# Altium schematic symbol library BIblioteka.SchLib: 66 symbols (part 1 of 3)
Pins are listed as number, name and electrical type; pins without a type are passive.

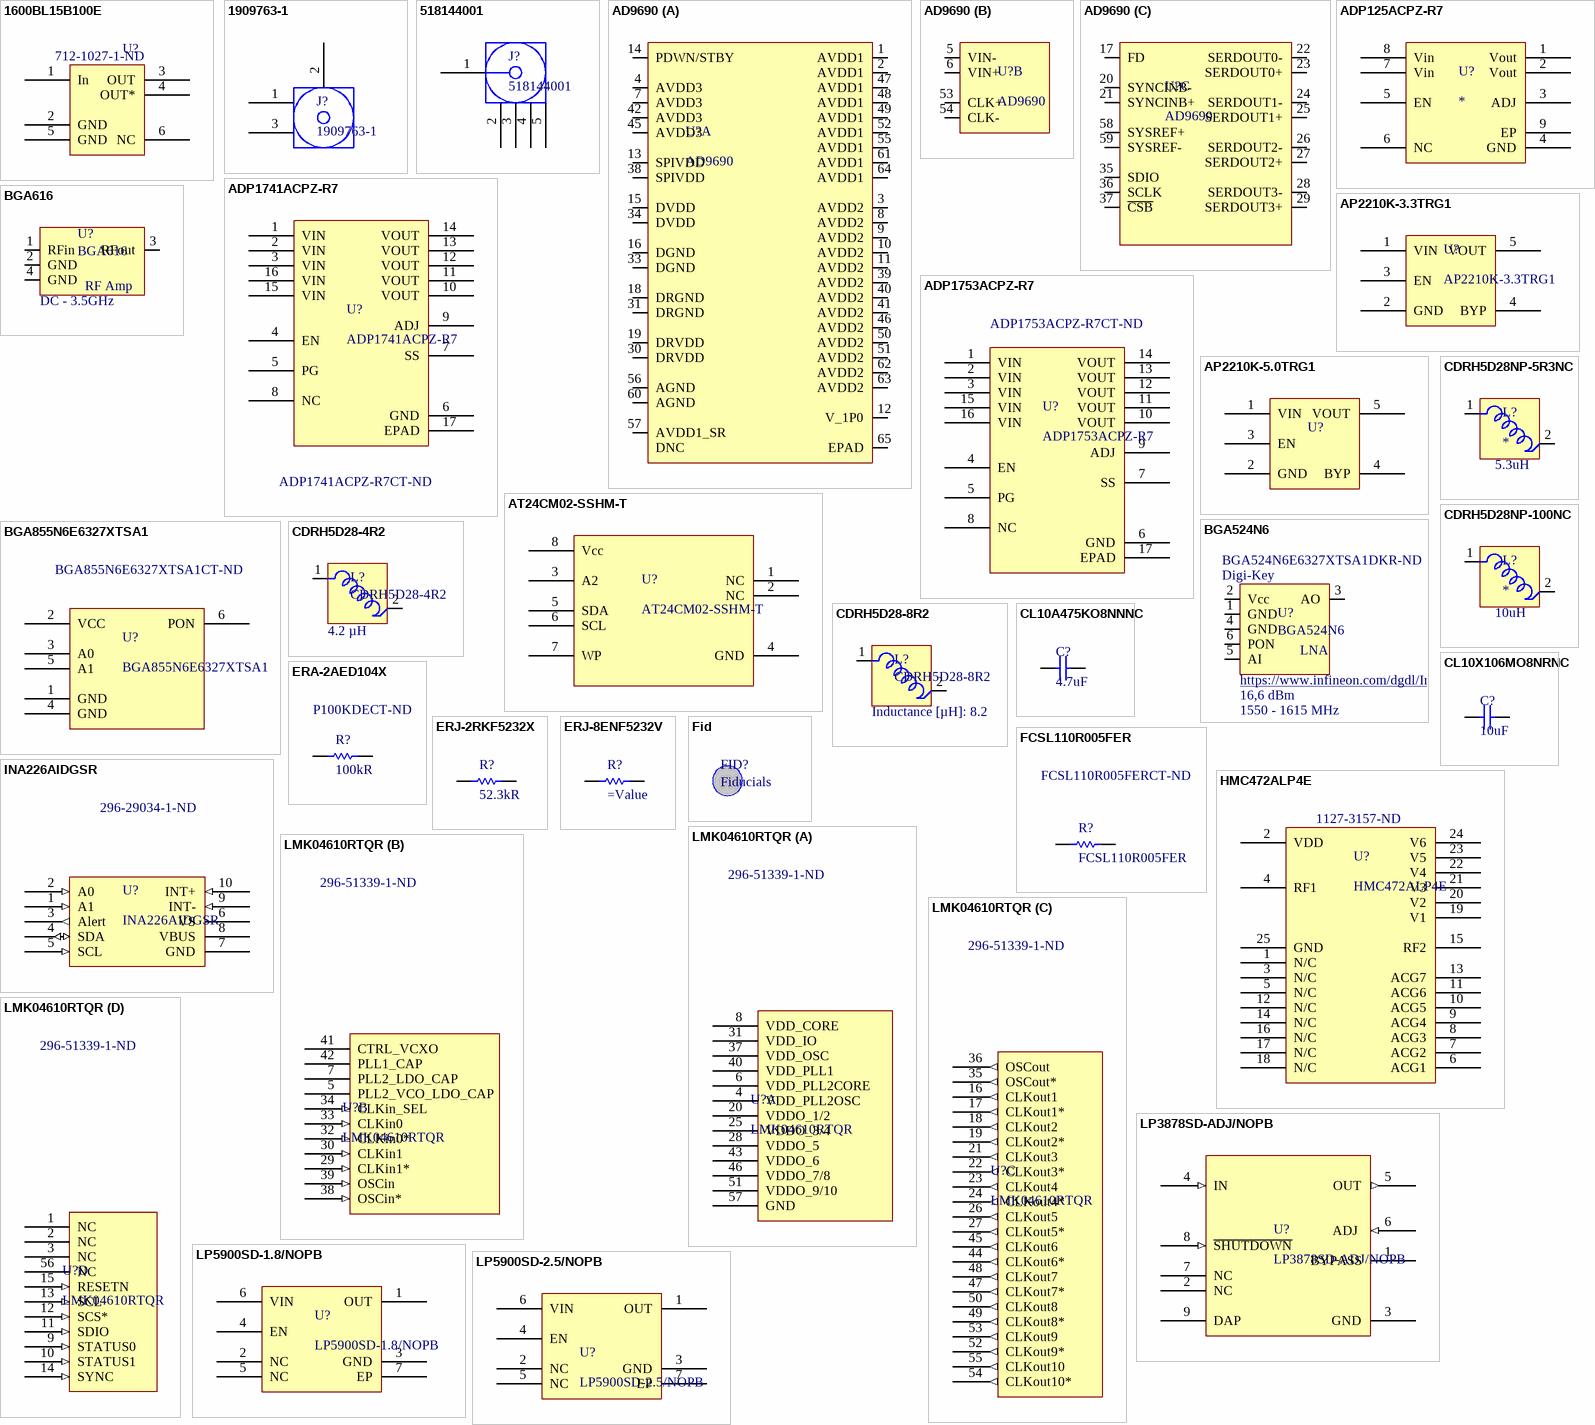
[diagram p0: symbols 1600BL15B100E to LP5900SD-2.5/NOPB]

## 1600BL15B100E
designator U?  Supplier Part Number 1: 712-1027-1-ND  (hidden comment: *)
BALUN WIMAX1600MHZ; Manufacturer: Johanson; Manufacturer Part Number: 1600BL15B100E; Frequency: 1.6GHz; Insertion Loss: 1dB; Impedance: 100R; Supplier 1: Digi-Key; RoHS: Yes; Category: Uncategorized; Stock 1: 406; Pricing 1: 1=0,83000, 10=0,80900, 25=0,54120, 50=0,48180, 100=0,44140, 250=0,39600, 500=0,38776, 1000=0,28050 (USD); Mount: Surface Mount; Case/Package: 0805; Case Code (Metric): 2012; Case Code (Imperial): 0805; Min Operating Temperature: -40°C; Max Operating Temperature: 85°C; Termination: SMD/SMT; Composition: Ceramic; Packaging: Tape and Reel; Package Quantity: 4000; Radiation Hardening: No; ComponentLink1URL: https://datasheet.ciiva.com/24023/balun-1600bl15b100-v2-242372-24023192.pdf?src-supplier=Mouser; ComponentLink1Description: https://datasheet.ciiva.com/24023/balun-1600bl15b100-v2-242372-24023192.pdf?src-supplier=Mouser; ComponentLink2URL: https://datasheet.ciiva.com/3859/balun-1600bl15b100-v2-3859272.pdf?src-supplier=Arrow+Electronics; ComponentLink2Description: https://datasheet.ciiva.com/3859/balun-1600bl15b100-v2-3859272.pdf?src-supplier=Arrow+Electronics; ComponentLink3URL: https://datasheet.ciiva.com/2788/1600bl15b100-2788754.pdf?src-supplier=Digi-Key; ComponentLink3Description: https://datasheet.ciiva.com/2788/1600bl15b100-2788754.pdf?src-supplier=Digi-Key; ComponentLink4URL: https://datasheet.ciiva.com/2788/1600bl15b100-2788755.pdf?src-supplier=Digi-Key; ComponentLink4Description: https://datasheet.ciiva.com/2788/1600bl15b100-2788755.pdf?src-supplier=Digi-Key; ComponentLink5URL: https://datasheet.ciiva.com/2788/1600bl15b100-2788756.pdf?src-supplier=Digi-Key; ComponentLink5Description: https://datasheet.ciiva.com/2788/1600bl15b100-2788756.pdf?src-supplier=Digi-Key
footprint 1600BL15B100 (1.7GHz 1:2 Ratio RF Balun, EIA 0805 SMD)
pins: 1 In "Unbalanced", 2 GND "GND (when no DC feed) or DC Bias+ RF Bypass Cap( when DC feed needed)", 3 OUT, 4 OUT*, 5 GND "GND (when no DC feed) or DC Bias+ RF Bypass Cap( when DC feed needed)", 6 NC

## 1909763-1
designator J?
Conn Coaxial PL 50Ohm Solder ST SMD Gold Over Nickel T/R; Manufacturer: TE Connectivity AMP; Body Material: Polymer,Liquid Crystal Polymer; Dielectric Material: Polymer; Impedance: 50R; Max Frequency: 6GHz; Connector Type: Jack; Gender: Female; Connector System: Cable-to-Board; Number of Positions: 1; Sealable: No (Without); Supplier 1: Digi-Key; Manufacturer Part Number: 1909763-1; Stock 1: 101549; Pricing 1: 1 = 0,50000, 10 = 0,47200, 100 = 0,36150, 500 = 0,31436, 1000 = 0,25935 (USD); RoHS: Yes; Mount: Panel; Case/Package: SMD/SMT; Contact Plating: Gold; Contact Material: Copper Alloy; Housing Color: Beige; Body Plating: Gold; Insulation Material: Thermoplastic; Min Operating Temperature: -40°C; Max Operating Temperature: 194°C; Packaging: Tape and Reel; Package Quantity: 1; Fastening Type: Push,Pull; Termination: SMD/SMT; Orientation: Straight; Frequency: 6GHz; Length: 3mm; Radiation Hardening: No; ELV: Compliant; Lead Free: Lead Free; ComponentLink1URL: https://datasheet.ciiva.com/16312/eng-cd-1909763-b-16312469.pdf?src-supplier=Future+Electronics; ComponentLink1Description: https://datasheet.ciiva.com/16312/eng-cd-1909763-b-16312469.pdf?src-supplier=Future+Electronics; ComponentLink2URL: https://datasheet.ciiva.com/9423/eng-cd-1909763-b-9423785.pdf?src-supplier=Avnet; ComponentLink2Description: https://datasheet.ciiva.com/9423/eng-cd-1909763-b-9423785.pdf?src-supplier=Avnet; ComponentLink3URL: https://datasheet.ciiva.com/29191/eng-cd-1909763-b1-basefilename-29191146.pdf?src-supplier=Digi-Key; ComponentLink3Description: https://datasheet.ciiva.com/29191/eng-cd-1909763-b1-basefilename-29191146.pdf?src-supplier=Digi-Key; ComponentLink4URL: https://datasheet.ciiva.com/16469/eng-cd-1909763-b-16469221.pdf?src-supplier=Avnet+Asia; ComponentLink4Description: https://datasheet.ciiva.com/16469/eng-cd-1909763-b-16469221.pdf?src-supplier=Avnet+Asia; ComponentLink5URL: https://datasheet.ciiva.com/29191/eng-cd-1909763-b1-basefilename-29191148.pdf?src-supplier=Digi-Key; ComponentLink5Description: https://datasheet.ciiva.com/29191/eng-cd-1909763-b1-basefilename-29191148.pdf?src-supplier=Digi-Key; Supplier Part Number 1: A118077CT-ND
footprint 1909763 (U.FL (UMCC) Connector Jack, Male Pin 50Ohm Surface Mount Solder)
pins: 1 Signal "Signal Pin", 2 GND (power), 3 GND (power)

## 518144001
designator J?
AMP - TE CONNECTIVITY - 5-1814400-1 - RF/COAXIAL, SMA JACK, R/A, 50 OHM, SOLDER; Body Plating: Gold; Dielectric Material: PTFE; Impedance: 50R; Frequency: 3GHz; Gender: Female; Mating Cycles: 500; Connector Type: SMA,Jack; Polarity: Standard,Normal; Sealable: No (Without); Connector System: Cable-to-Board; Number of Positions: 1; Voltage Rating: 500V; Tail Length: 0.153inch; Supplier 1: Newark; Manufacturer: TE Connectivity; Manufacturer Part Number: 518144001; Stock 1: 0; RoHS: Yes; Mount: PCB,Through Hole; Case/Package: SMA; Contact Material: Copper; Contact Plating: Copper,Gold; Insulation Material: Polytetrafluoroethylene; Housing Color: Gold; Min Operating Temperature: -67°C; Max Operating Temperature: 185°C; Termination: Through Hole; Orientation: Right Angle; Package Quantity: 1; Fastening Type: Threaded; Packaging: Bag; Max Frequency: 3GHz; Wire/Cable Type: Coaxial; Number of Ports: 1; Length: 0.559inch; Depth: 14.2mm; Radiation Hardening: No; REACH SVHC: No SVHC; ComponentLink1URL: https://datasheet.ciiva.com/25908/eng-cd-1814400-c1-25908579.pdf?src-supplier=Avnet+Europe; ComponentLink1Description: https://datasheet.ciiva.com/25908/eng-cd-1814400-c1-25908579.pdf?src-supplier=Avnet+Europe; ComponentLink2URL: https://datasheet.ciiva.com/642/eng-cd-1814400-d-basefilename-642807.pdf?src-supplier=Digi-Key; ComponentLink2Description: https://datasheet.ciiva.com/642/eng-cd-1814400-d-basefilename-642807.pdf?src-supplier=Digi-Key; ComponentLink3URL: https://datasheet.ciiva.com/11762/0900766b80944169-11762331.pdf?src-supplier=RSComponents; ComponentLink3Description: https://datasheet.ciiva.com/11762/0900766b80944169-11762331.pdf?src-supplier=RSComponents; ComponentLink4URL: https://datasheet.ciiva.com/5717/eng-cd-1814400-d-basefilename-5717965.pdf?src-supplier=Farnell; ComponentLink4Description: https://datasheet.ciiva.com/5717/eng-cd-1814400-d-basefilename-5717965.pdf?src-supplier=Farnell; ComponentLink5URL: https://datasheet.ciiva.com/16226/5-1814400-1-16226909.pdf?src-supplier=Future+Electronics; ComponentLink5Description: https://datasheet.ciiva.com/16226/5-1814400-1-16226909.pdf?src-supplier=Future+Electronics; ComponentLink6URL: https://datasheet.ciiva.com/23769/1663573-23769679.pdf?src-supplier=Newark; ComponentLink6Description: https://datasheet.ciiva.com/23769/1663573-23769679.pdf?src-supplier=Newark; ComponentLink7URL: https://datasheet.ciiva.com/14567/70084631-14567190.pdf?src-supplier=Allied+Electronics; ComponentLink7Description: https://datasheet.ciiva.com/14567/70084631-14567190.pdf?src-supplier=Allied+Electronics; ComponentLink8URL: https://datasheet.ciiva.com/3131/eng-cd-1814400-c1-3131994.pdf?src-supplier=Avnet; ComponentLink8Description: https://datasheet.ciiva.com/3131/eng-cd-1814400-c1-3131994.pdf?src-supplier=Avnet; Supplier Part Number 1: 28AC9813
footprint 5-1814400-1 (SMA Connector Jack, Female Socket 50Ohm Through Hole, Right Angle Solder)
pins: 1 Signal "Signal Pin", 2 GND, 3 GND, 4 GND, 5 GND

## AD9690
designator U?
Manufacturer: Analog Devices; Manufacturer Part Number: AD9690BCPZ-500; Number of Bits: 14; Sampling Rate: 500MS/s; Number of Inputs: 1; Min Supply Voltage: 3.2V; Max Supply Voltage: 3.4V; Interface: Serial; Resolution: 14b; Supply Type: Single; Differential Nonlinearity: 0.5LSB; Integral Nonlinearity (INL): 2.5LSB; Power Dissipation: 1.5W; Supplier 1: Digi-Key; Supplier Part Number 1: AD9690BCPZ-500-ND; Stock 1: 6; Pricing 1: 1 = 199,64000, 10 = 191,20500, 25 = 186,98720 (USD); RoHS: Yes; Mount: Surface Mount; Number of Pins: 64; Min Operating Temperature: -40°C; Max Operating Temperature: 85°C; Packaging: Tray; Number of A/D Converters: 1; REACH SVHC: No SVHC; Lead Free: Lead Free; ComponentLink1URL: http://www.mouser.com/ds/2/609/AD9690-534148.pdf?src-supplier=Mouser; ComponentLink1Description: http://www.mouser.com/ds/2/609/AD9690-534148.pdf?src-supplier=Mouser; ComponentLink2URL: http://www.analog.com/media/en/technical-documentation/data-sheets/AD9690.pdf?src-supplier=Digi-Key; ComponentLink2Description: http://www.analog.com/media/en/technical-documentation/data-sheets/AD9690.pdf?src-supplier=Digi-Key; ComponentLink3URL: http://www.farnell.com/datasheets/2146909.pdf?src-supplier=Element14; ComponentLink3Description: http://www.farnell.com/datasheets/2146909.pdf?src-supplier=Element14; ComponentLink4URL: http://www.analog.com/media/en/technical-documentation/data-sheets/AD9690.pdf?src-supplier=Avnet; ComponentLink4Description: http://www.analog.com/media/en/technical-documentation/data-sheets/AD9690.pdf?src-supplier=Avnet
footprint AD9690 (AD9690 9 x 9mm, 64 pin, 0.5 pitch 7.6sq Pad)
part A pins: 1 AVDD1, 2 AVDD1, 3 AVDD2, 4 AVDD3, 7 AVDD3, 8 AVDD2, 9 AVDD2, 10 AVDD2, 11 AVDD2, 12 V_1P0, 13 SPIVDD, 14 PDWN/STBY, 15 DVDD, 16 DGND, 18 DRGND, 19 DRVDD, 30 DRVDD, 31 DRGND, 33 DGND, 34 DVDD, 38 SPIVDD, 39 AVDD2, 40 AVDD2, 41 AVDD2, 42 AVDD3, 44, 43, 32 DNC, 45 AVDD3, 46 AVDD2, 47 AVDD1, 48 AVDD1, 49 AVDD1, 50 AVDD2, 51 AVDD2, 52 AVDD1, 55 AVDD1, 56 AGND, 57 AVDD1_SR, 60 AGND, 61 AVDD1, 62 AVDD2, 63 AVDD2, 64 AVDD1, 65 EPAD
part B pins: 5 VIN-, 6 VIN+, 53 CLK+, 54 CLK-
part C pins: 17 FD, 20 SYNCINB-, 21 SYNCINB+, 22 SERDOUT0-, 23 SERDOUT0+, 24 SERDOUT1-, 25 SERDOUT1+, 26 SERDOUT2-, 27 SERDOUT2+, 28 SERDOUT3-, 29 SERDOUT3+, 35 SDIO, 36 SCLK, 37 ~{CSB}, 58 SYSREF+, 59 SYSREF-

## ADP125ACPZ-R7
designator U?
IC REG LIN POS ADJ 500MA 8LFCSP; Manufacturer: Analog Devices; Manufacturer Part Number: ADP125ACPZ-R7; Output Voltage: 5V; Number of Outputs: 1; Dropout Voltage: 130mV; Max Input Voltage: 5.5V; Min Input Voltage: 2.3V; Min Current Limit: 550mA; Polarity: Positive; Quiescent Current: 45uA; Reference Voltage: 500mV; Min Output Voltage: 800mV; Accuracy: 1%; Power Supply Rejection Ratio (PSRR): 60dB; Max Supply Current: 210uA; Output Type: Adjustable; Supplier 1: Farnell; Stock 1: 261; RoHS: Yes; Case/Package: MSOP; Number of Pins: 8; Contact Plating: Gold; Min Operating Temperature: -40°C; Max Operating Temperature: 125°C; Output Current: 500mA; Max Output Current: 500mA; Packaging: Tape and Reel; Number of Regulators: 1; Max Output Voltage: 5V; Nominal Supply Current: 45uA; Operating Supply Current: 45uA; Length: 2mm; Height: 0.6mm; Width: 2mm; REACH SVHC: No SVHC; Lead Free: Contains Lead; ComponentLink1URL: https://datasheet.ciiva.com/17365/adp124-125-17365589.pdf?src-supplier=Avnet+Europe; ComponentLink1Description: https://datasheet.ciiva.com/17365/adp124-125-17365589.pdf?src-supplier=Avnet+Europe; ComponentLink2URL: https://datasheet.ciiva.com/2056/adp124-125-2056955.pdf?src-supplier=Digi-Key; ComponentLink2Description: https://datasheet.ciiva.com/2056/adp124-125-2056955.pdf?src-supplier=Digi-Key; ComponentLink3URL: https://datasheet.ciiva.com/2056/adp124-125-2056954.pdf?src-supplier=Digi-Key; ComponentLink3Description: https://datasheet.ciiva.com/2056/adp124-125-2056954.pdf?src-supplier=Digi-Key; ComponentLink4URL: https://datasheet.ciiva.com/2056/adp124-125-2056956.pdf?src-supplier=Digi-Key; ComponentLink4Description: https://datasheet.ciiva.com/2056/adp124-125-2056956.pdf?src-supplier=Digi-Key; ComponentLink5URL: https://datasheet.ciiva.com/48694/001251247-da-01-en-ic-reg-l-adj-adp125acpz-r7-lfcspud-8-adi-48694599.pdf?src-supplier=Conrad; ComponentLink5Description: https://datasheet.ciiva.com/48694/001251247-da-01-en-ic-reg-l-adj-adp125acpz-r7-lfcspud-8-adi-48694599.pdf?src-supplier=Conrad; Supplier 2: Digi-Key; Manufacturer 2: Analog Devices; Manufacturer Part Number 2: ADP125ACPZ-R7; Stock 2: 12322; Pricing 2: 1=1.39000, 10=1.23900, 25=1.17600, 100=0.96600, 250=0.90300, 500=0.79800, 1000=0.63000 (USD); ComponentLink6URL: http://datasheet.octopart.com/ADP125ACPZ-R7-Analog-Devices-datasheet-11525030.pdf?src-supplier=Newark; ComponentLink6Description: http://datasheet.octopart.com/ADP125ACPZ-R7-Analog-Devices-datasheet-11525030.pdf?src-supplier=Newark; ComponentLink7URL: http://datasheet.octopart.com/ADP125ACPZ-R7-Analog-Devices-datasheet-38878834.pdf?src-supplier=Newark; ComponentLink7Description: http://datasheet.octopart.com/ADP125ACPZ-R7-Analog-Devices-datasheet-38878834.pdf?src-supplier=Newark; ComponentLink8URL: http://datasheet.octopart.com/ADP125ACPZ-R7-Analog-Devices-datasheet-10623001.pdf?src-supplier=Analog+Devices; ComponentLink8Description: http://datasheet.octopart.com/ADP125ACPZ-R7-Analog-Devices-datasheet-10623001.pdf?src-supplier=Analog+Devices; ComponentLink9URL: http://datasheet.octopart.com/ADP125ACPZ-R7-Analog-Devices-datasheet-8638579.pdf?src-supplier=Analog+Devices; ComponentLink9Description: http://datasheet.octopart.com/ADP125ACPZ-R7-Analog-Devices-datasheet-8638579.pdf?src-supplier=Analog+Devices; ComponentLink10URL: http://datasheet.octopart.com/ADP125ACPZ-R7-Analog-Devices-datasheet-11776558.pdf?src-supplier=Arrow; ComponentLink10Description: http://datasheet.octopart.com/ADP125ACPZ-R7-Analog-Devices-datasheet-11776558.pdf?src-supplier=Arrow; Supplier Part Number 2: ADP125ACPZ-R7CT-ND; Supplier Part Number 1: 2457144
footprint ADP124_125 (8-Lead Lead Frame Chip Scale Package [LFCSP_UD]  2 mm × 2 mm Body, Ultra Thin, Dual Lead  (CP-8-10))
pins: 1 Vout, 2 Vout, 3 ADJ, 4 GND, 5 EN, 6 NC, 7 Vin, 8 Vin, 9 EP "To GND"

## ADP1741ACPZ-R7
designator U?  Supplier Part Number 1: ADP1741ACPZ-R7CT-ND
IC REG LIN POS ADJ 2A 16LFCSP; Manufacturer: Analog Devices; Output Voltage: 3V; Max Input Voltage: 3.6V; Min Input Voltage: 1.6V; Min Output Voltage: 750mV; Operating Supply Current: 1.8mA; Power Supply Rejection Ratio (PSRR): 70dB; Dropout Voltage: 160mV; Number of Outputs: 1; Min Current Limit: 2.4A; Polarity: Positive; Accuracy: 1%; Output Type: Adjustable; Supplier 1: Digi-Key; Manufacturer Part Number: ADP1741ACPZ-R7; Stock 1: 7057; Pricing 1: 1 = 3,42000, 10 = 3,07000, 25 = 2,90240, 100 = 2,51540, 250 = 2,38644, 500 = 2,14136 (USD); RoHS: Yes; Case/Package: LFCSP EP; Number of Pins: 16; Min Operating Temperature: -40°C; Max Operating Temperature: 125°C; Output Current: 2A; Max Output Current: 2A; Packaging: Tape and Reel; Max Output Voltage: 3V; Max Supply Current: 1.8mA; Number of Regulators: 1; Output Voltage Accuracy: 1%; Radiation Hardening: No; REACH SVHC: No SVHC; Lead Free: Contains Lead; ComponentLink1URL: https://datasheet.ciiva.com/2041/adp1740-1741-2041344.pdf?src-supplier=Digi-Key; ComponentLink1Description: https://datasheet.ciiva.com/2041/adp1740-1741-2041344.pdf?src-supplier=Digi-Key; ComponentLink2URL: https://datasheet.ciiva.com/15364/adp1740-1741-259394-15364336.pdf?src-supplier=Mouser; ComponentLink2Description: https://datasheet.ciiva.com/15364/adp1740-1741-259394-15364336.pdf?src-supplier=Mouser; ComponentLink3URL: https://datasheet.ciiva.com/23604/697190-23604608.pdf?src-supplier=Newark; ComponentLink3Description: https://datasheet.ciiva.com/23604/697190-23604608.pdf?src-supplier=Newark; ComponentLink4URL: https://datasheet.ciiva.com/2041/adp1740-1741-2041345.pdf?src-supplier=Digi-Key; ComponentLink4Description: https://datasheet.ciiva.com/2041/adp1740-1741-2041345.pdf?src-supplier=Digi-Key; ComponentLink5URL: https://datasheet.ciiva.com/3224/adp1740-1741-3224694.pdf?src-supplier=Avnet; ComponentLink5Description: https://datasheet.ciiva.com/3224/adp1740-1741-3224694.pdf?src-supplier=Avnet; ComponentLink6URL: https://datasheet.ciiva.com/17365/adp1740-1741-17365261.pdf?src-supplier=Avnet+Europe; ComponentLink6Description: https://datasheet.ciiva.com/17365/adp1740-1741-17365261.pdf?src-supplier=Avnet+Europe; ComponentLink7URL: https://datasheet.ciiva.com/2041/adp1740-1741-2041343.pdf?src-supplier=Digi-Key; ComponentLink7Description: https://datasheet.ciiva.com/2041/adp1740-1741-2041343.pdf?src-supplier=Digi-Key
footprint ADP1752_1753/ADP1740_1741 (16-Lead Lead Frame Chip Scale Package [LFCSP_WQ]  4 mm × 4 mm Body, Very Very Thin Quad  (CP-16-23))
pins: 1 VIN, 2 VIN, 3 VIN, 4 EN, 5 PG, 6 GND, 7 SS, 8 NC, 9 ADJ, 10 VOUT, 11 VOUT, 12 VOUT, 13 VOUT, 14 VOUT, 15 VIN, 16 VIN, 17 EPAD

## ADP1753ACPZ-R7
designator U?  Supplier Part Number 1: ADP1753ACPZ-R7CT-ND
IC REG LIN POS ADJ 800MA 16LFCSP; Manufacturer: Analog Devices; Number of Outputs: 1; Output Voltage: 3V; Dropout Voltage: 70mV; Max Input Voltage: 3.6V; Min Input Voltage: 1.6V; Min Current Limit: 1A; Polarity: Positive; Accuracy: 2%; Min Output Voltage: 750mV; Power Supply Rejection Ratio (PSRR): 65dB; Nominal Supply Current: 1.4mA; Output Type: Adjustable; Supplier 1: Digi-Key; Manufacturer Part Number: ADP1753ACPZ-R7; Stock 1: 1570; Pricing 1: 1 = 2,85000, 10 = 2,56400, 25 = 2,41880, 100 = 2,06070, 250 = 1,93496, 500 = 1,69308 (USD); RoHS: Yes; Case/Package: LFCSP EP; Number of Pins: 16; Min Operating Temperature: -40°C; Max Operating Temperature: 125°C; Output Current: 800mA; Max Output Current: 800mA; Packaging: Tape and Reel; Number of Regulators: 1; Max Output Voltage: 3V; Operating Supply Current: 1.4mA; Max Supply Current: 1.4mA; Length: 4mm; Height: 0.83mm; Width: 4mm; Radiation Hardening: No; REACH SVHC: No SVHC; Lead Free: Contains Lead; ComponentLink1URL: https://datasheet.ciiva.com/26908/adp1753acpz-r7-26908167.pdf?src-supplier=IIIC; ComponentLink1Description: https://datasheet.ciiva.com/26908/adp1753acpz-r7-26908167.pdf?src-supplier=IIIC; ComponentLink2URL: https://datasheet.ciiva.com/8241/adp1752-1753-8241910.pdf?src-supplier=Avnet; ComponentLink2Description: https://datasheet.ciiva.com/8241/adp1752-1753-8241910.pdf?src-supplier=Avnet; ComponentLink3URL: https://datasheet.ciiva.com/2041/adp1752-1753-2041241.pdf?src-supplier=Digi-Key; ComponentLink3Description: https://datasheet.ciiva.com/2041/adp1752-1753-2041241.pdf?src-supplier=Digi-Key; ComponentLink4URL: https://datasheet.ciiva.com/2041/adp1752-1753-2041242.pdf?src-supplier=Digi-Key; ComponentLink4Description: https://datasheet.ciiva.com/2041/adp1752-1753-2041242.pdf?src-supplier=Digi-Key; ComponentLink5URL: https://datasheet.ciiva.com/2041/adp1752-1753-2041243.pdf?src-supplier=Digi-Key; ComponentLink5Description: https://datasheet.ciiva.com/2041/adp1752-1753-2041243.pdf?src-supplier=Digi-Key; ComponentLink6URL: https://datasheet.ciiva.com/17365/adp1752-1753-17365277.pdf?src-supplier=Avnet+Europe; ComponentLink6Description: https://datasheet.ciiva.com/17365/adp1752-1753-17365277.pdf?src-supplier=Avnet+Europe
footprint ADP1752_1753/ADP1740_1741 (16-Lead Lead Frame Chip Scale Package [LFCSP_WQ]  4 mm × 4 mm Body, Very Very Thin Quad  (CP-16-23))
pins: 1 VIN, 2 VIN, 3 VIN, 4 EN, 5 PG, 6 GND, 7 SS, 8 NC, 9 ADJ, 10 VOUT, 11 VOUT, 12 VOUT, 13 VOUT, 14 VOUT, 15 VIN, 16 VIN, 17 EPAD

## AP2210K-3.3TRG1
designator U?
IC REG LINEAR 3.3V 300MA SOT23-5; Manufacturer 1: Diodes; Dropout Voltage: 250mV; Number of Outputs: 1; Min Input Voltage: 2.5V; Max Input Voltage: 13.2V; Quiescent Current: 150uA; Polarity: Positive; Accuracy: 1%; Power Supply Rejection Ratio (PSRR): 75dB; Output Type: Fixed; Supplier 1: Digi-Key; Manufacturer Part Number 1: AP2210K-3.3TRG1; Stock 1: 89118; Pricing 1: 1=0.42000, 10=0.31700, 100=0.19730, 500=0.13496, 1000=0.10382 (USD); RoHS: Yes; Mount: Surface Mount; Case/Package: SOT-23-5; Number of Pins: 5; Weight: 0.001058oz; Min Operating Temperature: -40°C; Max Operating Temperature: 125°C; Package Quantity: 1; Packaging: Tape and Reel; Max Output Current: 300mA; Output Voltage: 3.3V; Output Current: 300mA; Number of Regulators: 1; Length: 3.02mm; Height: 1.3mm; Width: 1.7mm; Radiation Hardening: No; Lead Free: Lead Free; ComponentLink1URL: http://www.mouser.com/ds/2/115/AP2210-271459.pdf?src-supplier=Mouser; ComponentLink1Description: http://www.mouser.com/ds/2/115/AP2210-271459.pdf?src-supplier=Mouser; ComponentLink2URL: http://www.alliedelec.com/m/d/24500b427815944890653ed70b5a0b32.pdf?src-supplier=Allied+Electronics; ComponentLink2Description: http://www.alliedelec.com/m/d/24500b427815944890653ed70b5a0b32.pdf?src-supplier=Allied+Electronics; ComponentLink3URL: https://www.diodes.com/assets/Datasheets/AP2210.pdf?src-supplier=Digi-Key; ComponentLink3Description: https://www.diodes.com/assets/Datasheets/AP2210.pdf?src-supplier=Digi-Key; ComponentLink4URL: http://www.diodes.com/datasheets/AP2210.pdf?src-supplier=Avnet; ComponentLink4Description: http://www.diodes.com/datasheets/AP2210.pdf?src-supplier=Avnet; Supplier Part Number 1: AP2210K-3.3TRG1DICT-ND
footprint AP2210K-3.3TRG1 (SOT23, 5-Leads, Body 2.96x2.83mm, Pitch 0.95mm, IPC High Density)
pins: 1 VIN, 2 GND, 3 EN, 4 BYP, 5 VOUT

## AP2210K-5.0TRG1
designator U?  (value not drawn)
IC REG LINEAR 5V 300MA SOT23-5; Manufacturer: Diodes; Manufacturer Part Number: AP2210K-5.0TRG1; Output Type: Fixed; Power Supply Rejection Ratio (PSRR): 75dB; Number of Outputs: 1; Min Input Voltage: 2.5V; Max Input Voltage: 13.2V; Dropout Voltage: 250mV; Polarity: Positive; Quiescent Current: 150uA; Accuracy: 1%; Supplier 1: Digi-Key; RoHS: Yes; Category: Voltage Regulators - Linear; Stock 1: 36767; Pricing 1: 1=0,42000, 10=0,34200, 25=0,31280, 100=0,21090, 250=0,17452, 500=0,15998, 1000=0,11999 (USD); Mount: Surface Mount; Case/Package: SOT-23-5; Number of Pins: 5; Weight: 0.001058oz; Min Operating Temperature: -40°C; Max Operating Temperature: 125°C; Max Output Current: 300mA; Output Voltage: 5V; Package Quantity: 3000; Packaging: Tape and Reel; Output Current: 300mA; Number of Regulators: 1; Lead Free: Lead Free; ComponentLink1URL: https://datasheet.ciiva.com/29569/ap2210-29569974.pdf?src-supplier=Digi-Key; ComponentLink1Description: https://datasheet.ciiva.com/29569/ap2210-29569974.pdf?src-supplier=Digi-Key; ComponentLink2URL: https://datasheet.ciiva.com/29569/ap2210-29569975.pdf?src-supplier=Digi-Key; ComponentLink2Description: https://datasheet.ciiva.com/29569/ap2210-29569975.pdf?src-supplier=Digi-Key; ComponentLink3URL: https://datasheet.ciiva.com/29569/ap2210-29569976.pdf?src-supplier=Digi-Key; ComponentLink3Description: https://datasheet.ciiva.com/29569/ap2210-29569976.pdf?src-supplier=Digi-Key; Supplier Part Number 1: AP2210K-5.0TRG1DICT-ND
footprint AP2210K-3.3TRG1 (SOT23, 5-Leads, Body 2.96x2.83mm, Pitch 0.95mm, IPC High Density)
pins: 1 VIN, 2 GND, 3 EN, 4 BYP, 5 VOUT

## AT24CM02-SSHM-T
designator U?
1.7-5.5V 1MHZ IND TMP 8-SOIC-N; Manufacturer: Microchip; Supplier 1: Digi-Key; Manufacturer Part Number: AT24CM02-SSHM-T; Stock 1: 24235; Pricing 1: 1 = 2,51000, 25 = 2,42040, 100 = 2,41540 (USD); RoHS: No; ComponentLink1URL: http://www.microchip.com/mymicrochip/filehandler.aspx?ddocname=en589710&src-supplier=Digi-Key; ComponentLink1Description: http://www.microchip.com/mymicrochip/filehandler.aspx?ddocname=en589710&src-supplier=Digi-Key; Supplier Part Number 1: AT24CM02-SSHM-TCT-ND
footprint AT24CM02
pins: 1 NC, 2 NC, 3 A2, 4 GND, 5 SDA, 6 SCL, 7 WP, 8 Vcc

## BGA524N6
designator U?  Operating Frequency: 1550 - 1615 MHz  Gain: 16,6 dBm  Supplier 1: Digi-Key  Supplier Part Number 1: BGA524N6E6327XTSA1DKR-ND
Part Number: BGA524N6; URL: https://www.infineon.com/dgdl/Infineon-BGA524N6-DS-v03_00-en.pdf?fileId=db3a304344e406b50144e44dfad302b9
footprint TSNP-6-10-FP (TSNP-6-10-FP, SOTFL, 6-Leads, Body 1,10x0,80mm, Pitch 0,40mm, IPC Medium Density)
pins: 1 GND, 2 Vcc, 3 AO, 4 GND, 5 AI, 6 PON
text: LNA

## BGA616
designator U?  Frequency: DC - 3.5GHz
Supplier 1: Digi-Key; Supplier Part Number 1: BGA616H6327XTSA1CT-ND
footprint GPS05605 (SOT343, 4-Leads, Body 2,00x2,15mm, Pitch 1,30mm, IPC High Density)
pins: 1 RFin, 2 GND, 3 RFout, 4 GND
text: RF Amp

## BGA855N6E6327XTSA1
designator U?  Supplier Part Number 1: BGA855N6E6327XTSA1CT-ND
Manufacturer: Infineon; Supplier 1: Digi-Key; Manufacturer Part Number: BGA855N6E6327XTSA1; Stock 1: 11880; Pricing 1: 1 = 0,66000, 10 = 0,57800, 100 = 0,44300, 500 = 0,35020, 1000 = 0,28016 (USD); RoHS: No
footprint BGA855N6 (TSNP-6-10 leadless package (footprint: 0.7 x 1.1 mm2)
pins: 1 GND, 2 VCC, 3 A0, 4 GND, 5 A1, 6 PON

## CDRH5D28-4R2
designator L?  Inductance: 4.2 µH
Supplier 1: Digi-Key; Supplier Part Number 1: 308-2193-1-ND
footprint CDRH5D28 (CDRH5D28 , Precision Wire Wound Inductor, 2-Leads, Body 6,00x6,00mm, IPC High Density)
pins: 1, 2

## CDRH5D28-8R2
designator L?  Inductance [µH]: 8.2
Part Number: CDRH5D28NP-8R2; Supplier Part Number 2: 308-2309-6-ND; Supplier 2: Digi-Key
footprint CDRH5D28 (CDRH5D28 , Precision Wire Wound Inductor, 2-Leads, Body 6,00x6,00mm, IPC High Density)
pins: 1, 2

## CDRH5D28NP-5R3NC
designator L?  Inductance: 5.3uH
INDUCTOR POWER 5.3UH 1.90A SMD; Manufacturer: Sumida; Manufacturer Part Number: CDRH5D28NP-5R3NC; Core Material: Ferrite; DC Resistance (DCR): 38mR; Test Frequency: 100kHz; Tolerance: 30%; Shielding: Shielded; Max DC Current: 1.9A; Supplier 1: Digi-Key; RoHS: Yes; Category: Fixed Inductors; Stock 1: 1381; Pricing 1: 1=0,78000, 10=0,68400, 100=0,48880, 500=0,41056, 1000=0,33235 (USD); Mount: Surface Mount; Case/Package: Nonstandard; Weight: 0.01411oz; Min Operating Temperature: -40°C; Max Operating Temperature: 100°C; Package Quantity: 2000; Packaging: Tape and Reel; Current Rating: 1.9A; Termination: SMD/SMT; DC Current: 1.9A; Military Standard: Not; Length: 6mm; Height: 3mm; Width: 0.224inch; Height - Seated (Max): 0.118inch; Depth: 6mm; Radiation Hardening: No; Lead Free: Lead Free; ComponentLink1URL: https://datasheet.ciiva.com/29691/cdrh5d28-29691750.pdf?src-supplier=Digi-Key; ComponentLink1Description: https://datasheet.ciiva.com/29691/cdrh5d28-29691750.pdf?src-supplier=Digi-Key; ComponentLink2URL: https://datasheet.ciiva.com/29691/cdrh5d28-29691751.pdf?src-supplier=Digi-Key; ComponentLink2Description: https://datasheet.ciiva.com/29691/cdrh5d28-29691751.pdf?src-supplier=Digi-Key; Supplier Part Number 1: 308-2308-1-ND
footprint CDRH5D28 (CDRH5D28 , Precision Wire Wound Inductor, 2-Leads, Body 6,00x6,00mm, IPC High Density)
pins: 1, 2

## CDRH5D28NP-100NC
designator L?  Inductance: 10uH
Inductor Power Shielded Drum Core 10uH 30% 100KHz Ferrite 1.3A 65mOhm DCR T/R; Manufacturer: Sumida; Manufacturer Part Number: CDRH5D28NP-100NC; DC Resistance (DCR): 65mR; Supplier 1: Mouser; RoHS: Yes; Category: Fixed Inductors; Stock 1: 3724; Pricing 1: 1=0,68000, 10=0,52000, 100=0,40200, 1000=0,28900, 2000=0,26300, 10000=0,25500, 24000=0,24600, 50000=0,23800, 100000=0,22600 (USD); Mount: Surface Mount; Case/Package: Nonstandard; Core Material: Ferrite; Min Operating Temperature: -40°C; Max Operating Temperature: 100°C; Tolerance: 30%; Shielding: Shielded; Packaging: Tape and Reel; Package Quantity: 1; Current Rating: 1.3A; Max DC Current: 1.3A; Termination: SMD/SMT; Test Frequency: 100kHz; DC Current: 1.3A; Military Standard: Not; Length: 6mm; Height: 3mm; Width: 6mm; Height - Seated (Max): 0.118inch; Depth: 6mm; Radiation Hardening: No; Lead Free: Lead Free; ComponentLink1URL: https://datasheet.ciiva.com/26793/cdrh5d28np-100nc-26793522.pdf?src-supplier=IIIC; ComponentLink1Description: https://datasheet.ciiva.com/26793/cdrh5d28np-100nc-26793522.pdf?src-supplier=IIIC; Supplier Part Number 1: 851-CDRH5D28NP-100NC
footprint CDRH5D28 (CDRH5D28 , Precision Wire Wound Inductor, 2-Leads, Body 6,00x6,00mm, IPC High Density)
pins: 1, 2

## CL10A475KO8NNNC
designator C?, comment 4.7uF
Cap Ceramic 4.7uF 16V X5R 10% SMD 0603 85C Paper T/R; Manufacturer: Samsung; Manufacturer Part Number: CL10A475KO8NNNC; Supplier 1: Digi-Key; Stock 1: 520133; Pricing 1: 1 = 0,26000, 10 = 0,17800, 100 = 0,10100, 500 = 0,07128, 1000 = 0,06237 (USD); RoHS: Yes; Mount: Surface Mount; Case/Package: 0603; Case Code (Metric): 1608; Case Code (Imperial): 0603; Material: Ceramic; Contact Plating: Tin; Min Operating Temperature: -55°C; Max Operating Temperature: 85°C; Tolerance: 10%; Packaging: Tape and Reel; Package Quantity: 1; Capacitance: 4.7uF; Voltage Rating: 16V; Dielectric: X5R; Voltage: 16V; Length: 1.6mm; Height: 0.8mm; Width: 0.031inch; Thickness: 0.035inch; Depth: 0.8mm; Radiation Hardening: No; ComponentLink1URL: https://datasheet.ciiva.com/25795/cl10a475ko8nnnc-25795890.pdf?src-supplier=Digi-Key; ComponentLink1Description: https://datasheet.ciiva.com/25795/cl10a475ko8nnnc-25795890.pdf?src-supplier=Digi-Key; ComponentLink2URL: https://datasheet.ciiva.com/26838/getdatasheetpartid-358619-26838383.pdf?src-supplier=Verical; ComponentLink2Description: https://datasheet.ciiva.com/26838/getdatasheetpartid-358619-26838383.pdf?src-supplier=Verical; ComponentLink3URL: https://datasheet.ciiva.com/29198/457663-da-01-en-vs-kondensator-0603-29198671.pdf?src-supplier=Conrad; ComponentLink3Description: https://datasheet.ciiva.com/29198/457663-da-01-en-vs-kondensator-0603-29198671.pdf?src-supplier=Conrad; Supplier Part Number 1: 1276-1784-1-ND
footprint CAPC1608X08L (Chip Capacitor, 2-Leads, Body 1,60x0,80mm, IPC High Density)
pins: 1, 2

## CL10X106MO8NRNC
designator C?, comment 10uF
CAP CER 10UF 16V X6S 0603; Manufacturer: Samsung; Manufacturer Part Number: CL10X106MO8NRNC; Tolerance: 20%; Supplier 1: Digi-Key; Stock 1: 52811; Pricing 1: 1 = 0,24000, 10 = 0,16400, 100 = 0,09280, 500 = 0,06548, 1000 = 0,05729 (USD); RoHS: Yes; Mount: Surface Mount; Case/Package: 0603; Case Code (Metric): 1608; Case Code (Imperial): 0603; Min Operating Temperature: -55°C; Max Operating Temperature: 105°C; Packaging: Tape and Reel; Capacitance: 10uF; Voltage Rating: 16V; Length: 0.063inch; Width: 0.031inch; Thickness: 0.035inch; ComponentLink1URL: http://www.samsungsem.com/kr/support/product-search/mlcc/CL10X106MO8NRNC.jsp?src-supplier=Digi-Key; ComponentLink1Description: http://www.samsungsem.com/kr/support/product-search/mlcc/CL10X106MO8NRNC.jsp?src-supplier=Digi-Key; Supplier Part Number 1: 1276-6769-1-ND
footprint CAPC1608X08L (Chip Capacitor, 2-Leads, Body 1,60x0,80mm, IPC High Density)
pins: 1, 2

## ERA-2AED104X
designator R?, comment 100kR  Supplier Part Number 1: P100KDECT-ND
GLOVE, POLYAMIDE, L/FREE, PU, SIZE 6 - More Details; Manufacturer: Panasonic; Manufacturer Part Number: ERA-2AED104X; Tolerance: 0.5%; Power Rating: 63mW; Voltage Rating: 25V; Temperature Coefficient: 25ppm/°C; Supplier 1: Digi-Key; Stock 1: 66411; Pricing 1: 1 = 0,22000, 10 = 0,18800, 100 = 0,07350, 1000 = 0,03077, 2500 = 0,02820, 5000 = 0,02564 (USD); RoHS: Yes; Mount: Surface Mount; Case/Package: 0402; Case Code (Imperial): 0402; Case Code (Metric): 1005; Contact Plating: Tin; Min Operating Temperature: -55°C; Max Operating Temperature: 155°C; Resistance: 100kR; Packaging: Tape and Reel; Package Quantity: 10000; Composition: Metal Film,Thin Film; Number of Terminations: 2; Military Standard: Not; Termination: SMD/SMT; Max Power Dissipation: 63mW; Voltage Rating (DC): 25V; Length: 1mm; Height: 0.016inch; Width: 0.5mm; Depth: 0.5mm; Radiation Hardening: No; REACH SVHC: No SVHC; Lead Free: Lead Free; ComponentLink1URL: https://datasheet.ciiva.com/24028/aoa0000ce26-197354-24028150.pdf?src-supplier=Mouser; ComponentLink1Description: https://datasheet.ciiva.com/24028/aoa0000ce26-197354-24028150.pdf?src-supplier=Mouser; ComponentLink2URL: https://datasheet.ciiva.com/43470/1776116-43470438.pdf?src-supplier=Farnell; ComponentLink2Description: https://datasheet.ciiva.com/43470/1776116-43470438.pdf?src-supplier=Farnell; ComponentLink3URL: https://datasheet.ciiva.com/7830/1776116-7830920.pdf?src-supplier=Element14; ComponentLink3Description: https://datasheet.ciiva.com/7830/1776116-7830920.pdf?src-supplier=Element14; ComponentLink4URL: https://datasheet.ciiva.com/46378/1776116-46378234.pdf?src-supplier=Element14; ComponentLink4Description: https://datasheet.ciiva.com/46378/1776116-46378234.pdf?src-supplier=Element14; ComponentLink5URL: https://datasheet.ciiva.com/16780/70068849-16780139.pdf?src-supplier=Allied+Electronics; ComponentLink5Description: https://datasheet.ciiva.com/16780/70068849-16780139.pdf?src-supplier=Allied+Electronics; ComponentLink6URL: https://datasheet.ciiva.com/9117/aoa0000ce26-9117229.pdf?src-supplier=Avnet; ComponentLink6Description: https://datasheet.ciiva.com/9117/aoa0000ce26-9117229.pdf?src-supplier=Avnet; ComponentLink7URL: https://datasheet.ciiva.com/16511/aoa0000ce26-16511566.pdf?src-supplier=Avnet+Asia; ComponentLink7Description: https://datasheet.ciiva.com/16511/aoa0000ce26-16511566.pdf?src-supplier=Avnet+Asia; ComponentLink8URL: https://datasheet.ciiva.com/30225/54aoa0000ce26-30225311.pdf?src-supplier=Onlinecomponents.com; ComponentLink8Description: https://datasheet.ciiva.com/30225/54aoa0000ce26-30225311.pdf?src-supplier=Onlinecomponents.com
footprint RESC1005X04L (Chip Resistor, 2-Leads, Body 1,00x0,50mm, IPC High Density)
pins: 1, 2

## ERJ-2RKF5232X
designator R?, comment 52.3kR
RES SMD 52.3K OHM 1% 1/10W 0402; Manufacturer: Panasonic; Manufacturer Part Number: ERJ-2RKF5232X; Voltage Rating: 50V; Power Rating: 100mW; Temperature Coefficient: 100ppm/°C; Supplier 1: Digi-Key; Stock 1: 257478; Pricing 1: 1 = 0,10000, 10 = 0,04500, 100 = 0,01830, 1000 = 0,00823, 2500 = 0,00715, 5000 = 0,00590 (USD); RoHS: Yes; Mount: Surface Mount; Case/Package: 0402; Case Code (Imperial): 0402; Case Code (Metric): 1005; Contact Plating: Tin; Min Operating Temperature: -55°C; Max Operating Temperature: 155°C; Resistance: 52.3kR; Tolerance: 1%; Packaging: Tape and Reel; Package Quantity: 1; Termination: SMD/SMT; Composition: Thick Film; Number of Terminations: 2; Military Standard: Not; Max Power Dissipation: 100mW; Voltage Rating (DC): 50V; Features: Automotive AEC-Q200; Length: 1mm; Height: 0.016inch; Width: 0.5mm; Depth: 0.5mm; REACH SVHC: No SVHC; Lead Free: Lead Free; ComponentLink1URL: https://datasheet.ciiva.com/3883/3984280s8821682n1386-3883650.pdf?src-supplier=Arrow; ComponentLink1Description: https://datasheet.ciiva.com/3883/3984280s8821682n1386-3883650.pdf?src-supplier=Arrow; ComponentLink2URL: https://datasheet.ciiva.com/6201/426256-6201381.pdf?src-supplier=Farnell; ComponentLink2Description: https://datasheet.ciiva.com/6201/426256-6201381.pdf?src-supplier=Farnell; ComponentLink3URL: https://datasheet.ciiva.com/9188/aoa0000ce2-9188938.pdf?src-supplier=Avnet; ComponentLink3Description: https://datasheet.ciiva.com/9188/aoa0000ce2-9188938.pdf?src-supplier=Avnet; ComponentLink4URL: https://datasheet.ciiva.com/46389/426256-46389115.pdf?src-supplier=Element14; ComponentLink4Description: https://datasheet.ciiva.com/46389/426256-46389115.pdf?src-supplier=Element14; ComponentLink5URL: https://datasheet.ciiva.com/43460/426256-43460332.pdf?src-supplier=Farnell; ComponentLink5Description: https://datasheet.ciiva.com/43460/426256-43460332.pdf?src-supplier=Farnell; ComponentLink6URL: https://datasheet.ciiva.com/16781/70260748-16781070.pdf?src-supplier=Allied+Electronics; ComponentLink6Description: https://datasheet.ciiva.com/16781/70260748-16781070.pdf?src-supplier=Allied+Electronics; Supplier Part Number 1: P52.3KLCT-ND
footprint RESC1005X04L (Chip Resistor, 2-Leads, Body 1,00x0,50mm, IPC High Density)
pins: 1, 2

## ERJ-8ENF5232V
designator R?
Res Thick Film 1206 52.3K Ohm 1% 1/4W ±100ppm/C Molded SMD Punched Carrier T/R; Manufacturer: Panasonic; Manufacturer Part Number: ERJ-8ENF5232V; Resistance: 52.3kR; Power Rating: 250mW; Voltage Rating: 200V; Temperature Coefficient: 100ppm/°C; Supplier 1: Digi-Key; Stock 1: 54684; Pricing 1: 1 = 0,11000, 10 = 0,10000, 100 = 0,03850, 1000 = 0,01695, 2500 = 0,01464 (USD); RoHS: Yes; Mount: Surface Mount; Case/Package: 1206; Case Code (Imperial): 1206; Case Code (Metric): 3216; Contact Plating: Tin; Min Operating Temperature: -55°C; Max Operating Temperature: 155°C; Tolerance: 1%; Packaging: Tape and Reel; Package Quantity: 1; Composition: Thick Film; Number of Terminations: 2; Max Power Dissipation: 250mW; Voltage Rating (DC): 200V; Features: Automotive AEC-Q200; Military Standard: Not; Termination: SMD/SMT; Length: 3.2mm; Height: 0.028inch; Width: 1.6mm; Depth: 1.6mm; REACH SVHC: Yes; ComponentLink1URL: https://datasheet.ciiva.com/22730/1678782-22730069.pdf?src-supplier=Farnell; ComponentLink1Description: https://datasheet.ciiva.com/22730/1678782-22730069.pdf?src-supplier=Farnell; ComponentLink2URL: https://datasheet.ciiva.com/24066/aoa0000ce2-24066186.pdf?src-supplier=Mouser; ComponentLink2Description: https://datasheet.ciiva.com/24066/aoa0000ce2-24066186.pdf?src-supplier=Mouser; Supplier Part Number 1: P52.3KFCT-ND
footprint RESC3216X06L (Chip Resistor, 2-Leads, Body 3,20x1,60mm, IPC High Density)
pins: 1, 2

## FCSL110R005FER
designator R?  Supplier Part Number 1: FCSL110R005FERCT-ND
RES SMD 5 MOHM 5W 4320 WIDE; Manufacturer: Ohmite; Tolerance: 1%; Resistance: 5mR; Temperature Coefficient: 50ppm/°C; Supplier 1: Digi-Key; Manufacturer Part Number: FCSL110R005FER; Stock 1: 3877; Pricing 1: 1 = 2,79000, 10 = 2,47700, 25 = 2,29720, 50 = 2,16220, 100 = 1,89190, 250 = 1,62164, 500 = 1,35136 (USD); RoHS: Yes; Case/Package: Metal; Number of Pins: 2; Min Operating Temperature: -55°C; Max Operating Temperature: 155°C; Packaging: Tape and Reel; Package Quantity: 1; Max Power Dissipation: 5W; Features: Moisture Resistant; Power Rating: 5W; Termination: SMD/SMT; Composition: Metal Foil; Number of Terminations: 2; Length: 0.197inch; Height: 0.028inch; Width: 11mm; Depth: 5mm; REACH SVHC: Unknown; ComponentLink1URL: https://datasheet.ciiva.com/2484/res-fcsl-2484643.pdf?src-supplier=Digi-Key; ComponentLink1Description: https://datasheet.ciiva.com/2484/res-fcsl-2484643.pdf?src-supplier=Digi-Key; ComponentLink2URL: https://datasheet.ciiva.com/2484/res-fcsl-2484644.pdf?src-supplier=Digi-Key; ComponentLink2Description: https://datasheet.ciiva.com/2484/res-fcsl-2484644.pdf?src-supplier=Digi-Key; ComponentLink3URL: https://datasheet.ciiva.com/2484/res-fcsl-2484645.pdf?src-supplier=Digi-Key; ComponentLink3Description: https://datasheet.ciiva.com/2484/res-fcsl-2484645.pdf?src-supplier=Digi-Key; ComponentLink4URL: https://datasheet.ciiva.com/6181/fcsl-6181333.pdf?src-supplier=Farnell; ComponentLink4Description: https://datasheet.ciiva.com/6181/fcsl-6181333.pdf?src-supplier=Farnell; ComponentLink5URL: https://datasheet.ciiva.com/46422/1812595-46422917.pdf?src-supplier=Element14; ComponentLink5Description: https://datasheet.ciiva.com/46422/1812595-46422917.pdf?src-supplier=Element14; ComponentLink6URL: https://datasheet.ciiva.com/8080/fcsl-8080343.pdf?src-supplier=Element14; ComponentLink6Description: https://datasheet.ciiva.com/8080/fcsl-8080343.pdf?src-supplier=Element14
footprint FCSL110R005FERCT-ND (Wide 4320 (11050 Metric), 2043)
pins: 1, 2

## Fid
designator FID?, comment Fiducials
footprint Fiducials

## HMC472ALP4E
designator U?  Supplier Part Number 1: 1127-3157-ND
ANALOG DEVICES   HMC472ALP4E   RF ATTENUATOR, 3.8GHZ, 5.5V, HQFN-24; Min Supply Voltage: 4.5V; Attenuation Value: 31.5dB; Impedance: 50R; Max Power Dissipation: 560mW; Number of Bits: 6; Number of Channels: 1; Insertion Loss: 3dB; Operating Supply Voltage: 5V; Supplier 1: Digi-Key; Manufacturer: Analog Devices; Manufacturer Part Number: HMC472ALP4E; Stock 1: 867; Pricing 1: 1 = 7,47000, 10 = 6,84400, 25 = 6,22160, 100 = 5,59940, 250 = 5,13284, 500 = 4,66620, 1000 = 4,19958 (USD); RoHS: Yes; Mount: Surface Mount; Case/Package: SMD/SMT; Number of Pins: 24; Contact Plating: Tin,Matte; Min Operating Temperature: -40°C; Max Operating Temperature: 85°C; Max Supply Voltage: 5.5V; Packaging: Cut Tape; Max Frequency: 3.8GHz; Package Quantity: 50; Min Input Voltage: 4.5V; Max Input Voltage: 5.5V; REACH SVHC: No SVHC; Lead Free: Contains Lead; ComponentLink1URL: http://www.mouser.com/ds/2/609/hmc472a-879296.pdf?src-supplier=Mouser; ComponentLink1Description: http://www.mouser.com/ds/2/609/hmc472a-879296.pdf?src-supplier=Mouser; ComponentLink2URL: http://www.analog.com/media/en/technical-documentation/data-sheets/hmc472a.pdf?src-supplier=Avnet+Asia; ComponentLink2Description: http://www.analog.com/media/en/technical-documentation/data-sheets/hmc472a.pdf?src-supplier=Avnet+Asia; ComponentLink3URL: http://www.farnell.com/datasheets/1868224.pdf?src-supplier=Element14; ComponentLink3Description: http://www.farnell.com/datasheets/1868224.pdf?src-supplier=Element14; ComponentLink4URL: https://www.hittite.com/content/documents/data_sheet/hmc472alp4.pdf?src-supplier=Avnet; ComponentLink4Description: https://www.hittite.com/content/documents/data_sheet/hmc472alp4.pdf?src-supplier=Avnet; ComponentLink5URL: https://www.analog.com/media/en/technical-documentation/data-sheets/hmc472a.pdf?src-supplier=Digi-Key; ComponentLink5Description: https://www.analog.com/media/en/technical-documentation/data-sheets/hmc472a.pdf?src-supplier=Digi-Key
footprint HMC472ALP4E (24-VFQFN Exposed Pad)
pins: 1 N/C, 2 VDD, 3 N/C, 4 RF1, 5 N/C, 6 ACG1, 7 ACG2, 8 ACG3, 9 ACG4, 10 ACG5, 11 ACG6, 12 N/C, 13 ACG7, 14 N/C, 15 RF2, 16 N/C, 17 N/C, 18 N/C, 19 V1, 20 V2, 21 V3, 22 V4, 23 V5, 24 V6, 25 GND

## INA226AIDGSR
designator U?  Supplier Part Number 1: 296-29034-1-ND
IC MONITOR PWR/CURR BIDIR 10MSOP; Manufacturer: Texas Instruments; Min Supply Voltage: 2.7V; Max Supply Voltage: 5.5V; Nominal Supply Current: 330uA; Common Mode Rejection Ratio: 140dB; Output Current: 10mA; Input Bias Current: 10uA; Input Offset Voltage (Vos): 2.5uV; Accuracy: 0.02%; Supplier 1: Digi-Key; Manufacturer Part Number: INA226AIDGSR; Stock 1: 62024; Pricing 1: 1 = 2,88000, 10 = 2,58900, 100 = 2,12100, 500 = 1,80554, 1000 = 1,52275 (USD); RoHS: Yes; Mount: Surface Mount; Case/Package: VSSOP; Number of Pins: 10; Contact Plating: Gold; Min Operating Temperature: -40°C; Max Operating Temperature: 125°C; Packaging: Tape and Reel; Package Quantity: 1; Radiation Hardening: No; REACH SVHC: No SVHC; Lead Free: Lead Free; ComponentLink1URL: https://datasheet.ciiva.com/1939/ina226-1939633.pdf?src-supplier=Digi-Key; ComponentLink1Description: https://datasheet.ciiva.com/1939/ina226-1939633.pdf?src-supplier=Digi-Key; ComponentLink2URL: https://datasheet.ciiva.com/4875/sbos547-126280-4875559.pdf?src-supplier=Mouser; ComponentLink2Description: https://datasheet.ciiva.com/4875/sbos547-126280-4875559.pdf?src-supplier=Mouser; ComponentLink3URL: https://datasheet.ciiva.com/1939/ina226-1939634.pdf?src-supplier=Digi-Key; ComponentLink3Description: https://datasheet.ciiva.com/1939/ina226-1939634.pdf?src-supplier=Digi-Key; ComponentLink4URL: https://datasheet.ciiva.com/1939/ina226-1939635.pdf?src-supplier=Digi-Key; ComponentLink4Description: https://datasheet.ciiva.com/1939/ina226-1939635.pdf?src-supplier=Digi-Key; ComponentLink5URL: https://datasheet.ciiva.com/14196/ina226-14196741.pdf?src-supplier=Avnet; ComponentLink5Description: https://datasheet.ciiva.com/14196/ina226-14196741.pdf?src-supplier=Avnet; ComponentLink6URL: https://datasheet.ciiva.com/22693/1840205-22693516.pdf?src-supplier=Element14; ComponentLink6Description: https://datasheet.ciiva.com/22693/1840205-22693516.pdf?src-supplier=Element14
footprint INA226 (TSSOP, 10-Leads, Body 3,00x3,00mm, Pitch 0,50mm, IPC Medium Density)
pins: 1 A1 (in), 2 A0 (in), 3 Alert (out), 4 SDA (io), 5 SCL (in), 6 VS, 7 GND, 8 VBUS, 9 INT- (in), 10 INT+ (in)

## LMK04610RTQR
designator U?  Supplier Part Number 1: 296-51339-1-ND
Manufacturer: Texas Instruments; Number of Inputs: 2; Number of Outputs: 10; Supplier 1: Digi-Key; Manufacturer Part Number: LMK04610RTQR; Stock 1: 2022; Pricing 1: 1 = 20,47000, 10 = 18,87700, 100 = 16,11940, 500 = 14,63474 (USD); RoHS: No; Min Operating Temperature: -40°C; Max Operating Temperature: 85°C
footprint LMK04610 (PQFN, 56-Leads, Body 8,00x8,00mm, Pitch 0,50mm, Thermal Pad 5,70x5,70mm, IPC High Density)
part A pins: 4 VDD_PLL2OSC, 6 VDD_PLL2CORE, 8 VDD_CORE, 20 VDDO_1/2, 25 VDDO_3/4, 28 VDDO_5, 31 VDD_IO, 37 VDD_OSC, 40 VDD_PLL1, 43 VDDO_6, 46 VDDO_7/8, 51 VDDO_9/10, 57 GND
part B pins: 5 PLL2_VCO_LDO_CAP, 7 PLL2_LDO_CAP, 29 CLKin1* (in), 30 CLKin1 (in), 32 CLKin0* (in), 33 CLKin0 (in), 34 CLKin_SEL (in), 38 OSCin* (in), 39 OSCin (in), 41 CTRL_VCXO, 42 PLL1_CAP
part C pins: 16 CLKout1 (out), 17 CLKout1* (out), 18 CLKout2 (out), 19 CLKout2* (out), 21 CLKout3 (out), 22 CLKout3* (out), 23 CLKout4 (out), 24 CLKout4* (out), 26 CLKout5 (out), 27 CLKout5* (out), 35 OSCout* (out), 36 OSCout (out), 44 CLKout6* (out), 45 CLKout6 (out), 47 CLKout7* (out), 48 CLKout7 (out), 49 CLKout8* (out), 50 CLKout8 (out), 52 CLKout9* (out), 53 CLKout9 (out), 54 CLKout10* (out), 55 CLKout10 (out)
part D pins: 1 NC, 2 NC, 3 NC, 9 STATUS0 (in), 10 STATUS1 (in), 11 SDIO (in), 12 SCS* (in), 13 SCL (in), 14 SYNC (in), 15 RESETN (in), 56 NC

## LP3878SD-ADJ/NOPB
designator U?
Low Dropout Regulators - LDO Micropower 800mA Low Noise Adj Vltg Reg; Manufacturer 1: Texas Instruments; Output Voltage: 5.5V; Dropout Voltage: 475mV; Min Input Voltage: 2.5V; Max Input Voltage: 16V; Number of Outputs: 1; Quiescent Current: 5.5mA; Polarity: Positive; Accuracy: 1%; Min Output Voltage: 1V; Output Type: Adjustable; Supplier 1: Digi-Key; Manufacturer Part Number 1: LP3878SD-ADJ/NOPB; Stock 1: 29951; Pricing 1: 1=2.14000, 10=1.92200, 100=1.54450, 500=1.26896 (USD); RoHS: Yes; Mount: Surface Mount; Number of Pins: 8; Contact Plating: Tin,Matte; Min Operating Temperature: -40°C; Max Operating Temperature: 125°C; Output Current: 800mA; Package Quantity: 1000; Max Output Current: 800mA; Packaging: Tape and Reel; Max Output Voltage: 5.5V; Output Voltage Accuracy: 1%; Number of Regulators: 1; Length: 4mm; Height: 0.8mm; Width: 4mm; Radiation Hardening: No; REACH SVHC: No SVHC; Lead Free: Lead Free; ComponentLink1URL: https://datasheet.ciiva.com/27052/1329588-27052012.pdf?src-supplier=Jameco; ComponentLink1Description: https://datasheet.ciiva.com/27052/1329588-27052012.pdf?src-supplier=Jameco; ComponentLink2URL: https://datasheet.ciiva.com/1571/1846896-1571038.pdf?src-supplier=Farnell; ComponentLink2Description: https://datasheet.ciiva.com/1571/1846896-1571038.pdf?src-supplier=Farnell; ComponentLink3URL: https://datasheet.ciiva.com/7992/1814893-7992723.pdf?src-supplier=Element14; ComponentLink3Description: https://datasheet.ciiva.com/7992/1814893-7992723.pdf?src-supplier=Element14; ComponentLink4URL: https://datasheet.ciiva.com/25626/0900766b810fa759-25626986.pdf?src-supplier=RSComponents; ComponentLink4Description: https://datasheet.ciiva.com/25626/0900766b810fa759-25626986.pdf?src-supplier=RSComponents; ComponentLink5URL: https://datasheet.ciiva.com/6595/lp3878-adj-6595783.pdf?src-supplier=Digi-Key; ComponentLink5Description: https://datasheet.ciiva.com/6595/lp3878-adj-6595783.pdf?src-supplier=Digi-Key; ComponentLink6URL: https://datasheet.ciiva.com/25974/lp3878-adj-25974985.pdf?src-supplier=Avnet+Europe; ComponentLink6Description: https://datasheet.ciiva.com/25974/lp3878-adj-25974985.pdf?src-supplier=Avnet+Europe; ComponentLink7URL: https://datasheet.ciiva.com/3223/lp3878-adj-3223946.pdf?src-supplier=Avnet; ComponentLink7Description: https://datasheet.ciiva.com/3223/lp3878-adj-3223946.pdf?src-supplier=Avnet; ComponentLink8URL: https://datasheet.ciiva.com/6595/lp3878-adj-6595786.pdf?src-supplier=Digi-Key; ComponentLink8Description: https://datasheet.ciiva.com/6595/lp3878-adj-6595786.pdf?src-supplier=Digi-Key; ComponentLink9URL: https://datasheet.ciiva.com/46419/lp3878-adj-46419375.pdf?src-supplier=Element14; ComponentLink9Description: https://datasheet.ciiva.com/46419/lp3878-adj-46419375.pdf?src-supplier=Element14; Supplier Part Number 1: LP3878SD-ADJ/NOPBCT-ND
footprint LP3878-ADJ (SDC08A)
pins: 1 BYPASS, 2 NC, 3 GND, 4 IN (in), 5 OUT (out), 6 ADJ  (in), 7 NC, 8 ~{SHUTDOWN} (in), 9 DAP